# Altium schematic symbol library 2020-05-11_10-28-53.SchLib: 2 symbols
Pins are listed as number, name and electrical type; pins without a type are passive.

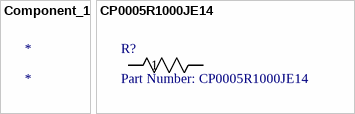
[diagram p0: symbols Component_1 to CP0005R1000JE14]

## Component_1
designator *

## CP0005R1000JE14
designator R?, comment Part Number: CP0005R1000JE14
No Description Available; Vendor: Vishay; Built_By: EMA_UL_Team; Manufacturer_Part_Number: CP0005R1000JE14; Copyright: Copyright (C) 2018 Accelerated Designs. All rights reserved; RefDes: RefDes; Type: DEV; Value: Value
footprint RES_CP0005
pins: 1, 2